# Altium footprint library BM04B-GHS-TBT.PcbLib: 1 footprints
Each footprint in its own frame and in the unit in brackets; x right, y up, seen from the top. Pads: shape width x height; smd on the part's side, far side on the other; paste and mask are expansions set on the pad; w line width, h text height; cw(c..) or ccw(c..) is an arc to the next point about the centre after c.
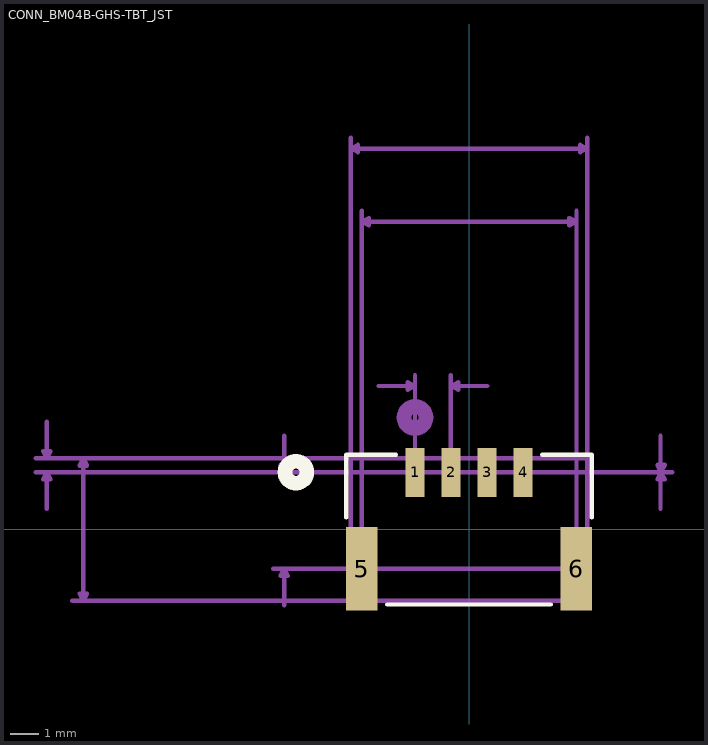
[diagram p0: the footprint, top view; thin cyan lines are the x and y axes]

## CONN_BM04B-GHS-TBT_JST [mil]
pads (6):
  rect 26x67 smd: 1(-73.82,77.81) 2(-24.61,77.81) 3(24.61,77.81) 4(73.82,77.81)
  rect 43x114 smd: 5(-146.65,-54.07) 6(146.65,-54.07)
Top Overlay:
  lines w6: -168,16 -168,102 -100,102 ; -112,-103 112,-103 ; 100,102 168,102 168,16
  lines w20: -252,78 cw(c-237,78) -222,78 cw(c-237,78) -252,78
Bottom Overlay:
  lines w20: -252,78 cw(c-237,78) -222,78 cw(c-237,78) -252,78
Mechanical 13:
  lines w6: -593,78 -578,78 ; -593,97 -578,97 ; -578,28 -578,78 ; -578,147 -578,97 ; -543,-98 -528,-98 ; -268,-54 -253,-54 ; -253,-104 -253,-54 ; -253,128 -253,78 ; -162,536 -162,521 ; -147,-54 -147,421 ; -147,436 -147,421 ; -124,196 -74,196 ; -74,211 -74,196 ; -25,78 -25,196 ; -25,211 -25,196 ; 25,196 -25,196 ; 147,436 147,421 ; 162,536 162,521 ; 262,28 262,78 ; 262,128 262,78 ; 278,78 262,78 ; -578,78 -573,68 -583,68 -578,78 ; -578,78 -253,78 ; -578,97 -528,97 ; -578,97 -573,107 -583,107 -578,97 ; -528,-98 -523,-88 -533,-88 -528,-98 ; -528,-98 -528,97 ; -528,-98 -162,-98 ; -528,97 -523,87 -533,87 -528,97 ; -528,97 -162,97 ; -253,-54 -248,-64 -258,-64 -253,-54 ; -253,-54 147,-54 147,421 ; -253,78 -248,88 -258,88 -253,78 ; -253,78 -74,78 ; -162,-98 -162,97 ; -162,-98 162,-98 162,97 ; -162,97 162,97 ; -162,97 -162,521 ; -162,521 -152,516 -152,526 -162,521 ; -162,521 162,521 ; -147,421 -137,416 -137,426 -147,421 ; -147,421 147,421 ; -74,78 262,78 ; -74,78 -74,196 ; -74,196 -84,191 -84,201 -74,196 ; -25,196 -15,191 -15,201 -25,196 ; 147,421 137,416 137,426 147,421 ; 162,97 162,521 ; 162,521 152,516 152,526 162,521 ; 262,78 268,68 258,68 262,78 ; 262,78 268,88 258,88 262,78
  lines w20: -89,153 cw(c-74,153) -59,153 cw(c-74,153) -89,153
  text "0.195in/4.953mm" at -866,-12 h25
  text "0.02in/0.5mm" at -848,75 h25
  text "-0.132in/-3.35mm" at -614,-1 h25
  text "0in/0mm" at 282,65 h25
  text "0.325in/8.255mm" at -159,541 h25
  text "0.293in/7.45mm" at -148,441 h25
  text "0.049in/1.25mm" at -209,216 h25
  text "Alt Padstyle 2: OX90Y60D30P" at -583,-796 h50
  text "Alt Padstyle 1: OX60Y90D30P" at -583,-721 h50
  text "Right Mtg Padstyle: RX50Y100D30P" at -689,-646 h50
  text "Left Mtg Padstyle: RX50Y100D30P" at -667,-571 h50
  text "3rd Mtg Padstyle: RX100Y50D40P" at -659,-496 h50
  text "2nd Mtg Padstyle: RX50Y100D40P" at -659,-421 h50
  text "1st Mtg Padstyle: RX43Y114D0T" at -629,-346 h50
  text "Default Padstyle: RX26Y67D0T" at -599,-271 h50
3D body "step_temp.STEP": height 159.45, standoff -5.91, extent -162.4,-83.66 162.4,111.22